# Altium schematic symbol library CAP,CER,1nF,1%,50V,C0G,0402.Schlib: 1 symbol
Pins are listed as number, name and electrical type; pins without a type are passive.

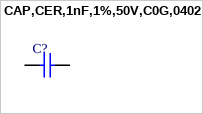
[diagram p0: symbol CAP,CER,1nF,1%,50V,C0G,0402]

## CAP,CER,1nF,1%,50V,C0G,0402
designator C?
pins: 1, 2